# Altium footprint library mod_display.PcbLib: 5 footprints
Each footprint in its own frame and in the unit in brackets; x right, y up, seen from the top. Pads: shape width x height; smd on the part's side, far side on the other; paste and mask are expansions set on the pad; w line width, h text height; cw(c..) or ccw(c..) is an arc to the next point about the centre after c.
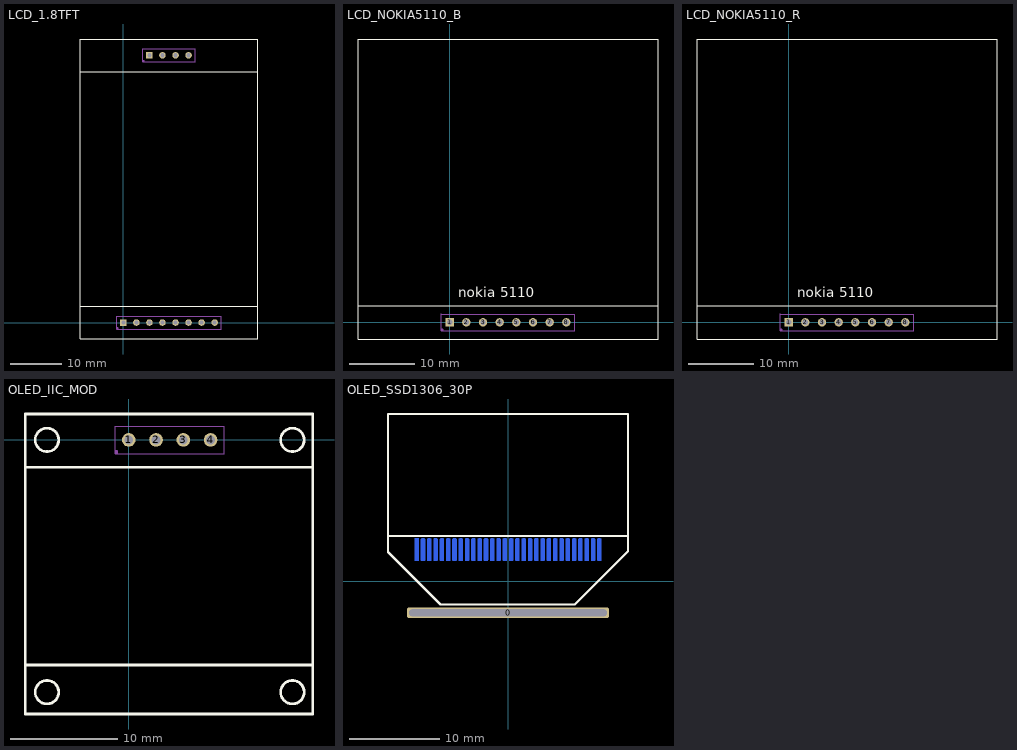
[diagram p0: the footprints below, top view; thin cyan lines are the x and y axes]

## LCD_1.8TFT [mil]
pads (12):
  rect 50x50 hole 32: 1(0,0) A1(200,2050)
  round 50 hole 32: 2(100,0) 3(200,0) 4(300,0) 5(400,0) 6(500,0) 7(600,0) 8(700,0) A2(300,2050) A3(400,2050) A4(500,2050)
Top Overlay:
  lines w4.72: -331,-126 1025.4,-126 1029.13,-122.27 1029.13,0 1029.13,125 ; -331,-125 -331,0 -331,125 ; -329.13,126.87 -329.13,1924 1027.27,1924 1031,1927.73 1031,2050 1031,2175 -329.13,2175 ; -329.13,1925 -329.13,2050 -329.13,2175 ; 1029.13,1925.87 1029.13,125 ; -331,125 1029.13,125 ; -331,125 -331,125 ; -329.13,2175 -329.13,2175
Mechanical 13:
  lines w2: -50,-50 -50,50 750,50 750,-50 -50,-50 ; 150,2000 150,2100 550,2100 550,2000 150,2000
Top Component:
  circle w2: c-45,-45 r5
  circle w2: c155,2005 r5
  region: -40,-45 -40,-45.99 -40.76,-47.83 -42.17,-49.24 -44.01,-50 -45,-50 -45.99,-50 -47.83,-49.24 -49.24,-47.83 -50,-45.99 -50,-45 -50,-44.01 -49.24,-42.17 -47.83,-40.76 -45.99,-40 -45,-40 -44.01,-40 -42.17,-40.76 -40.76,-42.17 -40,-44.01
  region: 160,2005 160,2004.01 159.24,2002.17 157.83,2000.76 155.99,2000 155,2000 154.01,2000 152.17,2000.76 150.76,2002.17 150,2004.01 150,2005 150,2005.99 150.76,2007.83 152.17,2009.24 154.01,2010 155,2010 155.99,2010 157.83,2009.24 159.24,2007.83 160,2005.99
  lines w2: -50,-50 750,-50 750,50 -50,50 -50,-50 ; 150,2000 150,2100 550,2100 550,2000 150,2000
  text ".Designator" at 370,-31 h80
3D body "User Library-JD-T18003.step": height 496.06, standoff 389.76, extent -319.29,116.05 1019.3,1936.03

## LCD_NOKIA5110_B [mil] "BLUE VERSION"
pads (8):
  rect 50x50 hole 32: 1(0,0)
  round 50 hole 32: 2(100,0) 3(200,0) 4(300,0) 5(400,0) 6(500,0) 7(600,0) 8(700,0)
Top Overlay:
  lines w4.72: -550,100 1250,100 ; -550,-100 -550,1700 1250,1700 1250,-100 -550,-100
  text "nokia 5110" at 50,150 h60
Mechanical 13:
  lines w2: -50,-50 -50,50 750,50 750,-50 -50,-50
Top Component:
  circle w2: c-45,-45 r5
  region: -40,-45 -40,-45.99 -40.76,-47.83 -42.17,-49.24 -44.01,-50 -45,-50 -45.99,-50 -47.83,-49.24 -49.24,-47.83 -50,-45.99 -50,-45 -50,-44.01 -49.24,-42.17 -47.83,-40.76 -45.99,-40 -45,-40 -44.01,-40 -42.17,-40.76 -40.76,-42.17 -40,-44.01
  lines w2: -50,-50 750,-50 750,50 -50,50 -50,-50
  text ".Designator" at 370,-31 h80
3D body "User Library-LCD5110R-1.step": height 574.41, standoff 342.13, extent -535.83,-85.83 1235.83,1685.82

## LCD_NOKIA5110_R [mil] "RED VERSION"
pads (8):
  rect 50x50 hole 32: 1(0,0)
  round 50 hole 32: 2(100,0) 3(200,0) 4(300,0) 5(400,0) 6(500,0) 7(600,0) 8(700,0)
Top Overlay:
  lines w4.72: -550,100 1250,100 ; -550,-100 -550,1700 1250,1700 1250,-100 -550,-100
  text "nokia 5110" at 50,150 h60
Mechanical 13:
  lines w2: -50,-50 -50,50 750,50 750,-50 -50,-50
Top Component:
  circle w2: c-45,-45 r5
  region: -40,-45 -40,-45.99 -40.76,-47.83 -42.17,-49.24 -44.01,-50 -45,-50 -45.99,-50 -47.83,-49.24 -49.24,-47.83 -50,-45.99 -50,-45 -50,-44.01 -49.24,-42.17 -47.83,-40.76 -45.99,-40 -45,-40 -44.01,-40 -42.17,-40.76 -40.76,-42.17 -40,-44.01
  lines w2: -50,-50 750,-50 750,50 -50,50 -50,-50
  text ".Designator" at 370,-31 h80
3D body "User Library-LCD5110R-1.step": height 180.71, standoff -51.57, extent -535.83,-85.83 1235.83,1685.83

## OLED_IIC_MOD [mil]
pads (4):
  round 50 hole 32: 1(0,0) 2(100,0) 3(200,0) 4(300,0)
Top Overlay:
  circle w10: c600,0 r43.01
  circle w10: c-300,0 r43.01
  circle w10: c-300,-925 r43.01
  circle w10: c600,-925 r43.01
  lines w10: -380,-825 675,-825 ; -380,-100 675,-100 ; -380,-1005 -380,95 675,95 675,-1005 -380,-1005
Top Assembly:
  circle w2: c-45,-45 r5
  region: -45,-50 -45.99,-50 -47.83,-49.24 -49.24,-47.83 -50,-45.99 -50,-45 -50,-44.01 -49.24,-42.17 -47.83,-40.76 -45.99,-40 -45,-40 -44.01,-40 -42.17,-40.76 -40.76,-42.17 -40,-44.01 -40,-45 -40,-45.99 -40.76,-47.83 -42.17,-49.24 -44.01,-50
  lines w2: -50,-50 -50,50 350,50 350,-50 -50,-50
  text ".Designator" at 170,-31 h80
Mechanical 13:
  lines w2: -50,-50 -50,50 350,50 350,-50 -50,-50
Top Component:
  circle w2: c-45,-45 r5
  region: -45,-50 -45.99,-50 -47.83,-49.24 -49.24,-47.83 -50,-45.99 -50,-45 -50,-44.01 -49.24,-42.17 -47.83,-40.76 -45.99,-40 -45,-40 -44.01,-40 -42.17,-40.76 -40.76,-42.17 -40,-44.01 -40,-45 -40,-45.99 -40.76,-47.83 -42.17,-49.24 -44.01,-50
  lines w2: -50,-50 -50,50 350,50 350,-50 -50,-50
  text ".Designator" at 170,-31 h80
3D body "User Library-128x64I2COLEDDisplayAdafruit.step": height 57.98, standoff -369.02, extent -376.59,-1003.85 674.59,93

## OLED_SSD1306_30P [mm]
pads (32):
  rrect50% 22.5x1.2 hole 0.762 slot 22 at 0 deg: 0(-0.003,-3.505)
  rect 0.45x2.5 smd far side: 1(-10.15,3.505)
  rrect50% 0.45x2.5 smd far side: 1(-10.15,3.505) 2(-9.45,3.505) 3(-8.75,3.505) 4(-8.05,3.505) 5(-7.35,3.505) 6(-6.65,3.505) 7(-5.95,3.505) 8(-5.25,3.505) 9(-4.55,3.505) 10(-3.85,3.505) 11(-3.15,3.505) 12(-2.45,3.505) 13(-1.75,3.505) 14(-1.05,3.505) 15(-0.35,3.505) 16(0.35,3.505) 17(1.05,3.505) 18(1.75,3.505) 19(2.45,3.505) 20(3.15,3.505) 21(3.85,3.505) 22(4.55,3.505) 23(5.25,3.505) 24(5.95,3.505) 25(6.65,3.505) 26(7.35,3.505) 27(8.05,3.505) 28(8.75,3.505) 29(9.45,3.505) 30(10.15,3.505)
Top Overlay:
  lines w0.254: -13.35,5.029 13.345,5.029 ; -13.35,16.688 -13.35,16.942 ; -13.35,3.251 -13.35,18.593 13.345,18.593 13.345,3.327 7.427,-2.591 -7.508,-2.591 -13.35,3.251
Bottom Overlay:
  circle w0.254: c8.062,0.279 r0.29
  circle w0.254: c-8.067,0.279 r0.29
  circle w0.254: c-11.471,4.648 r0.108
  lines w0.254: -11.05,3.505 -10.15,3.505 ; -5.959,-1.858 -8.163,-1.858 -11.05,1.029 -11.05,5.029 11.059,5.029 ; 5.954,-1.858 8.183,-1.858 11.07,1.029 11.07,5.029 ; 10.17,3.505 11.07,3.505
  text "ssd1306" at 4.861,-0.965 h1.52
3D body "User Library-096OLED.step": height 2.12, standoff -1.72, extent -13.238,-3.734 13.462,18.483